# Altium schematic symbol library TPS22919DCKR.SchLib: 1 symbol
Pins are listed as number, name and electrical type; pins without a type are passive.

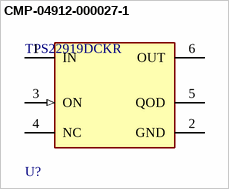
[diagram p0: symbol CMP-04912-000027-1]

## CMP-04912-000027-1
designator U?, comment TPS22919DCKR
POWER MANAGEMENT
footprint FP-DCK0006A-IPC_A
footprint FP-DCK0006A-MFG
footprint FP-DCK0006A-IPC_B
footprint FP-DCK0006A-IPC_C
pins: 1 IN (power), 2 GND (power), 3 ON (in), 4 NC, 5 QOD, 6 OUT (power)